# Altium footprint library CM5_Projeto_R6.PcbLib: 38 footprints (part 2 of 3)
Each footprint in its own frame and in the unit in brackets; x right, y up, seen from the top. Pads: shape width x height; smd on the part's side, far side on the other; paste and mask are expansions set on the pad; w line width, h text height; cw(c..) or ccw(c..) is an arc to the next point about the centre after c.
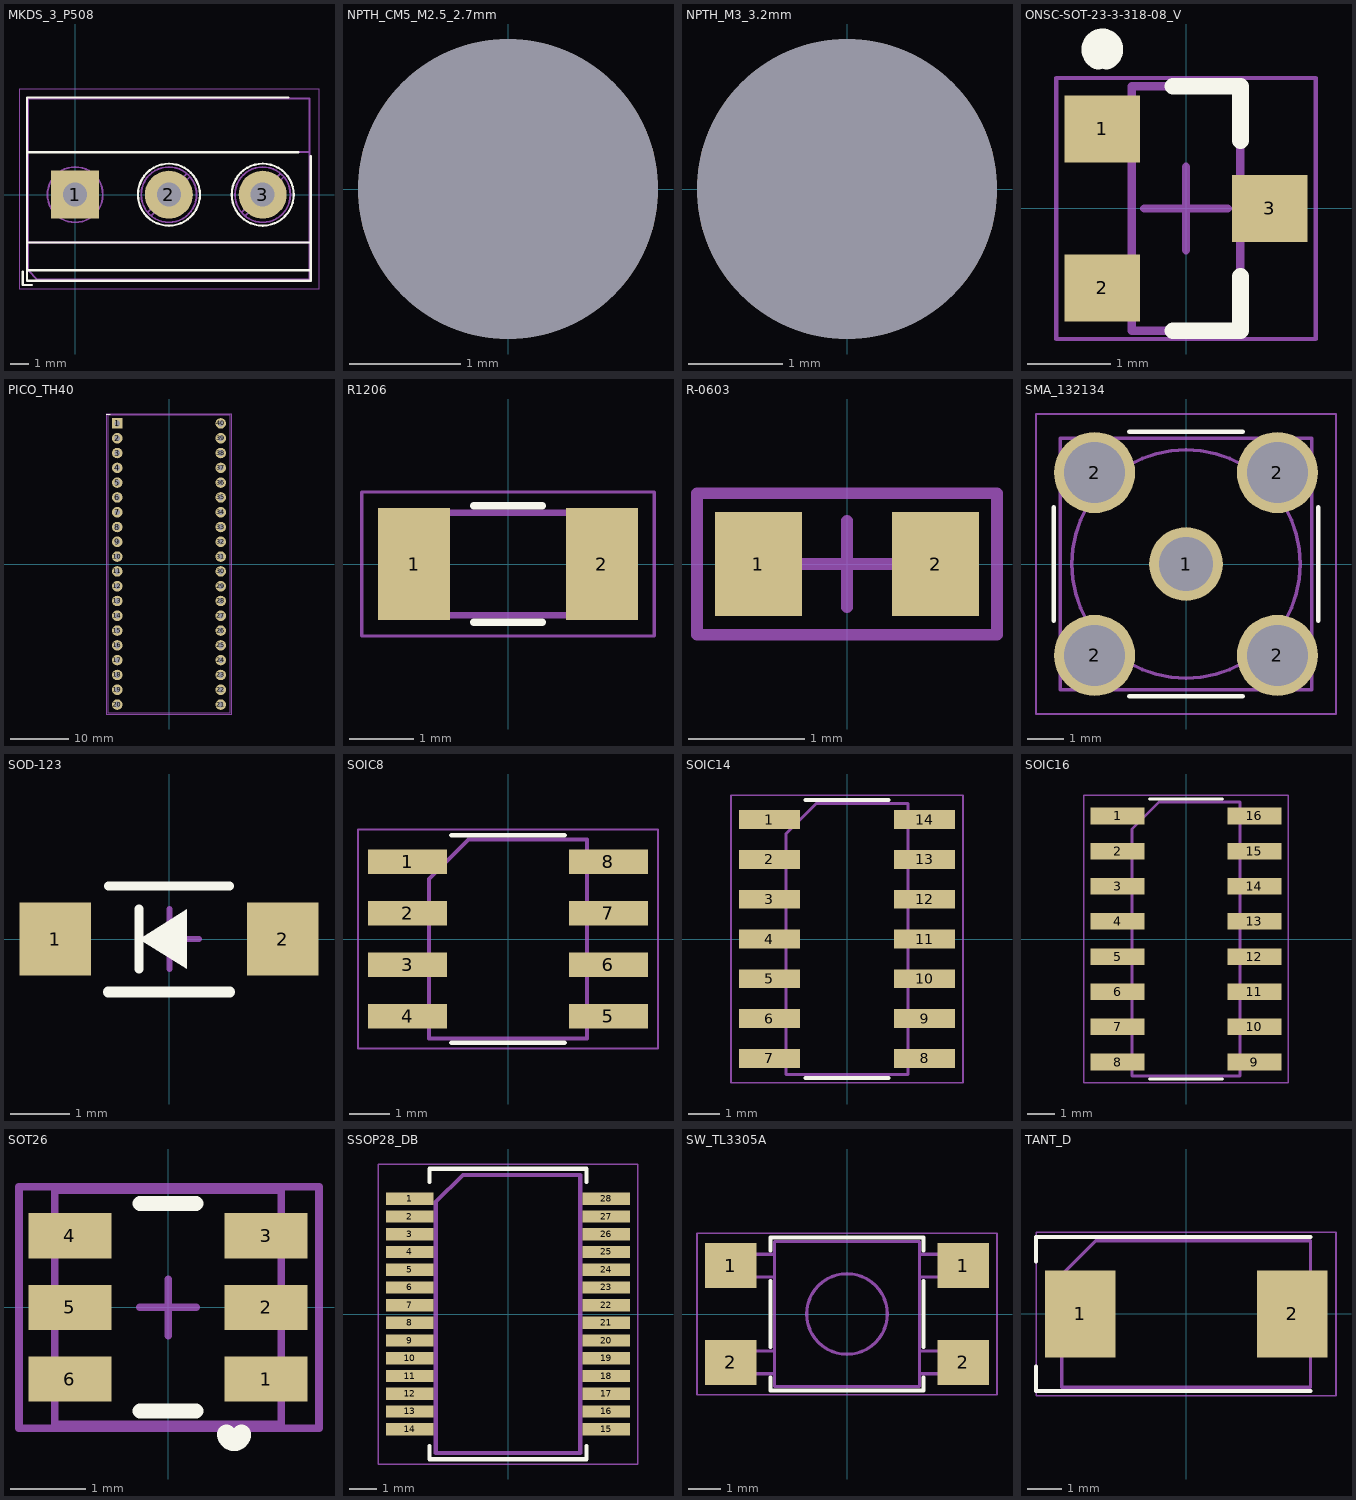
[diagram p1: the footprints below, top view; thin cyan lines are the x and y axes]

## MKDS_3_P508 [mm] "CM5 R3; fonte: CM5_Photonic.PcbLib; serigrafia revisada a 10 mil"
pads (3):
  rect 2.6x2.6 hole 1.3 paste-2.6 mask+0.05: 1(0,0)
  round 2.6 hole 1.3 paste-2.6 mask+0.05: 2(5.08,0) 3(10.16,0)
Top Overlay:
  lines w0.12: -2.84,-4.16 -2.84,-4.9 -2.34,-4.9 ; -2.6,-4.1 12.76,-4.1 ; -2.6,-2.6 12.76,-2.6 ; -2.6,2.301 12.106,2.301 ; 11.553,5.261 -2.6,5.261 -2.6,-4.66 12.76,-4.66 12.76,2.096 ; 3.4,0 3.414,-0.219 3.457,-0.435 3.528,-0.643 3.625,-0.84 3.747,-1.023 3.892,-1.188 4.057,-1.333 4.24,-1.455 4.437,-1.552 4.645,-1.623 4.861,-1.666 5.08,-1.68 5.299,-1.666 5.515,-1.623 5.723,-1.552 5.92,-1.455 6.103,-1.333 6.268,-1.188 6.413,-1.023 6.535,-0.84 6.632,-0.643 6.703,-0.435 6.746,-0.219 6.76,0 6.746,0.219 6.703,0.435 6.632,0.643 6.535,0.84 6.413,1.023 6.268,1.188 6.103,1.333 5.92,1.455 5.723,1.552 5.515,1.623 5.299,1.666 5.08,1.68 4.861,1.666 4.645,1.623 4.437,1.552 4.24,1.455 4.057,1.333 3.892,1.188 3.747,1.023 3.625,0.84 3.528,0.643 3.457,0.435 3.414,0.219 3.4,0 ; 8.48,0 8.494,-0.219 8.537,-0.435 8.608,-0.643 8.705,-0.84 8.827,-1.023 8.972,-1.188 9.137,-1.333 9.32,-1.455 9.517,-1.552 9.725,-1.623 9.941,-1.666 10.16,-1.68 10.379,-1.666 10.595,-1.623 10.803,-1.552 11,-1.455 11.183,-1.333 11.348,-1.188 11.493,-1.023 11.615,-0.84 11.712,-0.643 11.783,-0.435 11.826,-0.219 11.84,0 11.826,0.219 11.783,0.435 11.712,0.643 11.615,0.84 11.493,1.023 11.348,1.188 11.183,1.333 11,1.455 10.803,1.552 10.595,1.623 10.379,1.666 10.16,1.68 9.941,1.666 9.725,1.623 9.517,1.552 9.32,1.455 9.137,1.333 8.972,1.188 8.827,1.023 8.705,0.84 8.608,0.643 8.537,0.435 8.494,0.219 8.48,0
Bottom Assembly:
  drawing of 158 lines, arcs and shapes, not listed
Bottom Component Center:
  lines w0.05: -3.04,-5.1 -3.04,5.71 13.21,5.71 13.21,-5.1 -3.04,-5.1
3D body "MKDS_3_P508.step": height 13.8, standoff 0, extent -3.28,-4.6 12.7,5.2

## NPTH_CM5_M2.5_2.7mm [mm] "CM5 R3; fonte: CM5_Photonic.PcbLib; serigrafia revisada a 10 mil"
pads (1):
  round 2.7 hole 2.7 unplated paste-2.7 mask+0: ""(0,0)

## NPTH_M3_3.2mm [mm] "CM5 R3; fonte: CM5_Photonic.PcbLib; serigrafia revisada a 10 mil"
pads (1):
  round 3.2 hole 3.2 unplated paste-3.2 mask+0: ""(0,0)

## ONSC-SOT-23-3-318-08_V [mm] "CM5 R3; fonte: PCB-PCEIOT.PcbLib; serigrafia revisada a 10 mil"
pads (3):
  rect 0.9x0.8 smd paste+0 mask+0.05: 1(-1,0.95) 2(-1,-0.95) 3(1,0)
Top Overlay:
  lines w0.2: -0.155,-1.46 0.65,-1.46 0.65,-0.81 ; -0.155,1.46 0.65,1.46 0.65,0.81
  lines w0.25: -1.048,1.785 -1.054,1.787 -1.067,1.794 -1.079,1.803 -1.09,1.813 -1.099,1.824 -1.108,1.836 -1.114,1.85 -1.12,1.863 -1.123,1.878 -1.125,1.893 -1.125,1.907 -1.123,1.922 -1.12,1.937 -1.114,1.95 -1.108,1.964 -1.099,1.976 -1.09,1.987 -1.079,1.997 -1.067,2.006 -1.054,2.013 -1.04,2.018 -1.026,2.022 -1.011,2.025 -0.996,2.025 -0.982,2.024 -0.967,2.021 -0.953,2.016 -0.94,2.009 -0.927,2.002 -0.916,1.992 -0.905,1.982 -0.896,1.97 -0.889,1.957 -0.883,1.944 -0.878,1.929 -0.876,1.915 -0.875,1.9 -0.876,1.885 -0.878,1.871 -0.883,1.856 -0.889,1.843 -0.896,1.83 -0.905,1.818 -0.916,1.808 -0.927,1.798 -0.94,1.791 -0.951,1.785
Bottom Assembly:
  lines w0.05: -1.55,-1.56 -1.55,1.56 1.55,1.56 1.55,-1.56 -1.55,-1.56
  lines w0.1: -0.5,0 0.5,0 ; 0,-0.5 0,0.5
Mechanical 13:
  lines w0.1: -0.65,-1.46 -0.65,1.46 0.65,1.46 0.65,-1.46 -0.65,-1.46
3D body "SOT95P240X115-3M.step": height 1.15, standoff 0, extent -1.275,-1.5 1.275,1.5

## PICO_TH40 [mm] "CM5 R3; fonte: CM5_Photonic.PcbLib; serigrafia revisada a 10 mil"
pads (40):
  rect 1.8x1.8 hole 1 paste-1.8 mask+0.05: 1(-8.89,24.13)
  round 1.8 hole 1 paste-1.8 mask+0.05: 2(-8.89,21.59) 3(-8.89,19.05) 4(-8.89,16.51) 5(-8.89,13.97) 6(-8.89,11.43) 7(-8.89,8.89) 8(-8.89,6.35) 9(-8.89,3.81) 10(-8.89,1.27) 11(-8.89,-1.27) 12(-8.89,-3.81) 13(-8.89,-6.35) 14(-8.89,-8.89) 15(-8.89,-11.43) 16(-8.89,-13.97) 17(-8.89,-16.51) 18(-8.89,-19.05) 19(-8.89,-21.59) 20(-8.89,-24.13) 21(8.89,-24.13) 22(8.89,-21.59) 23(8.89,-19.05) 24(8.89,-16.51) 25(8.89,-13.97) 26(8.89,-11.43) 27(8.89,-8.89) 28(8.89,-6.35) 29(8.89,-3.81) 30(8.89,-1.27) 31(8.89,1.27) 32(8.89,3.81) 33(8.89,6.35) 34(8.89,8.89) 35(8.89,11.43) 36(8.89,13.97) 37(8.89,16.51) 38(8.89,19.05) 39(8.89,21.59) 40(8.89,24.13)
Top Overlay:
  lines w0.12: -10.75,25.7 -10.05,25.7
Bottom Assembly:
  lines w0.1: -10.5,-25.5 -10.5,25.5 10.5,25.5 10.5,-25.5 -10.5,-25.5
Bottom Component Center:
  lines w0.05: -10.75,-25.75 -10.75,25.75 10.75,25.75 10.75,-25.75 -10.75,-25.75
3D body "Pico_W_SC0918_usuario.step": height 10.1, standoff 6.5, extent -10.497,-25.502 10.503,26.798
3D body "Pico_TH40_headers_R4.step": height 7.7, standoff 0, extent -10.09,-25.4 10.09,25.4

## R1206 [mm] "CM5 R3; fonte: CM5_Photonic.PcbLib; serigrafia revisada a 10 mil"
pads (2):
  rect 1.125x1.75 smd paste+0 mask+0.05: 1(-1.463,0) 2(1.462,0)
Top Overlay:
  lines w0.12: -0.532,-0.91 0.532,-0.91 ; -0.532,0.91 0.532,0.91
Bottom Assembly:
  lines w0.1: -1.6,-0.8 -1.6,0.8 1.6,0.8 1.6,-0.8 -1.6,-0.8
Bottom Component Center:
  lines w0.05: -2.28,-1.12 -2.28,1.12 2.28,1.12 2.28,-1.12 -2.28,-1.12
3D body "R1206.step": height 0.55, standoff 0, extent -1.6,-0.8 1.6,0.8

## R-0603 [mm] "CM5 R3; fonte: PcbLib_Source_IoT.PcbLib; serigrafia revisada a 10 mil"
pads (2):
  rect 0.75x0.9 smd paste+0 mask+0.05: 1(-0.765,0) 2(0.765,0)
Bottom Assembly:
  lines w0.1: -0.375,0 0.375,0 ; 0,-0.375 0,0.375 ; -1.295,-0.61 -1.295,0.61 1.295,0.61 1.295,-0.61 -1.295,-0.61
Bottom Component Center:
  lines w0.1: -1.295,-0.61 -1.295,0.61 1.295,0.61 1.295,-0.61 -1.295,-0.61
3D body "User Library-Chip Resistor_0603 (1608).step": height 0.47, standoff 0, extent -0.8,-0.401 0.8,0.401

## SMA_132134 [mm] "CM5 R3; fonte: CM5_Photonic.PcbLib; serigrafia revisada a 10 mil"
pads (5):
  round 2.05 hole 1.5 paste-2.05 mask+0.05: 1(0,0)
  round 2.25 hole 1.7 paste-2.25 mask+0.05: 2(-2.54,-2.54) 2(-2.54,2.54) 2(2.54,-2.54) 2(2.54,2.54)
Top Overlay:
  lines w0.12: -3.68,-1.573 -3.68,1.573 ; -1.573,-3.68 1.573,-3.68 ; -1.573,3.68 1.573,3.68 ; 3.68,-1.573 3.68,1.573
Bottom Assembly:
  lines w0.1: -3.5,-3.5 -3.5,3.5 3.5,3.5 3.5,-3.5 -3.5,-3.5 ; -3.175,0 -3.148,-0.414 -3.067,-0.822 -2.933,-1.215 -2.75,-1.587 -2.519,-1.933 -2.245,-2.245 -1.933,-2.519 -1.587,-2.75 -1.215,-2.933 -0.822,-3.067 -0.414,-3.148 0,-3.175 0.414,-3.148 0.822,-3.067 1.215,-2.933 1.587,-2.75 1.933,-2.519 2.245,-2.245 2.519,-1.933 2.75,-1.587 2.933,-1.215 3.067,-0.822 3.148,-0.414 3.175,0 3.148,0.414 3.067,0.822 2.933,1.215 2.75,1.587 2.519,1.933 2.245,2.245 1.933,2.519 1.587,2.75 1.215,2.933 0.822,3.067 0.414,3.148 0,3.175 -0.414,3.148 -0.822,3.067 -1.215,2.933 -1.587,2.75 -1.933,2.519 -2.245,2.245 -2.519,1.933 -2.75,1.587 -2.933,1.215 -3.067,0.822 -3.148,0.414 -3.175,0
Bottom Component Center:
  lines w0.05: -4.17,-4.17 -4.17,4.17 4.17,4.17 4.17,-4.17 -4.17,-4.17
3D body "SMA_132134.step": height 8.1, standoff 0, extent -3.5,-3.5 3.5,3.5

## SOD-123 [mm] "CM5 R3; fonte: PcbLib_Source_IoT.PcbLib; serigrafia revisada a 10 mil"
pads (2):
  rect 1.2x1.22 smd paste+0 mask+0.05: 1(-1.905,0) 2(1.905,0)
Top Overlay:
  region: 0.3,-0.5 0.3,0.5 -0.5,0
  lines w0.152: -1.016,0.889 1.016,0.889 ; -0.5,-0.5 -0.5,0.5
  lines w0.178: -1.016,-0.889 1.016,-0.889
Bottom Assembly:
  lines w0.1: -0.495,0 0.505,0 ; 0.005,-0.5 0.005,0.5
3D body "SOD-123.stp": height 1.35, standoff 0, extent -1.932,-0.9 1.932,0.9

## SOIC8 [mm] "CM5 R3; fonte: CM5_Photonic.PcbLib; serigrafia revisada a 10 mil"
pads (8):
  rect 1.95x0.6 smd paste+0 mask+0.05: 1(-2.475,1.905) 2(-2.475,0.635) 3(-2.475,-0.635) 4(-2.475,-1.905) 5(2.475,-1.905) 6(2.475,-0.635) 7(2.475,0.635) 8(2.475,1.905)
Top Overlay:
  lines w0.12: -1.396,-2.56 0,-2.56 1.396,-2.56 ; -1.396,2.56 0,2.56 1.396,2.56
Bottom Assembly:
  lines w0.1: -1.95,-2.45 -1.95,1.475 -0.975,2.45 1.95,2.45 1.95,-2.45 -1.95,-2.45
Bottom Component Center:
  lines w0.05: -3.7,-2.7 -3.7,2.7 3.7,2.7 3.7,-2.7 -3.7,-2.7
3D body "SOIC8.step": height 1.75, standoff 0, extent -3,-2.45 3,2.45

## SOIC14 [mm] "CM5 R3; fonte: CM5_Photonic.PcbLib; serigrafia revisada a 10 mil"
pads (14):
  rect 1.95x0.6 smd paste+0 mask+0.05: 1(-2.475,3.81) 2(-2.475,2.54) 3(-2.475,1.27) 4(-2.475,0) 5(-2.475,-1.27) 6(-2.475,-2.54) 7(-2.475,-3.81) 8(2.475,-3.81) 9(2.475,-2.54) 10(2.475,-1.27) 11(2.475,0) 12(2.475,1.27) 13(2.475,2.54) 14(2.475,3.81)
Top Overlay:
  lines w0.12: -1.323,-4.435 0,-4.435 1.323,-4.435 ; -1.323,4.435 0,4.435 1.323,4.435
Bottom Assembly:
  lines w0.1: -1.95,-4.325 -1.95,3.35 -0.975,4.325 1.95,4.325 1.95,-4.325 -1.95,-4.325
Bottom Component Center:
  lines w0.05: -3.7,-4.58 -3.7,4.58 3.7,4.58 3.7,-4.58 -3.7,-4.58
3D body "SOIC14.step": height 1.75, standoff 0, extent -3,-4.35 3,4.35

## SOIC16 [mm] "CM5 R3; fonte: CM5_Photonic.PcbLib; serigrafia revisada a 10 mil"
pads (16):
  rect 1.95x0.6 smd paste+0 mask+0.05: 1(-2.475,4.445) 2(-2.475,3.175) 3(-2.475,1.905) 4(-2.475,0.635) 5(-2.475,-0.635) 6(-2.475,-1.905) 7(-2.475,-3.175) 8(-2.475,-4.445) 9(2.475,-4.445) 10(2.475,-3.175) 11(2.475,-1.905) 12(2.475,-0.635) 13(2.475,0.635) 14(2.475,1.905) 15(2.475,3.175) 16(2.475,4.445)
Top Overlay:
  lines w0.12: -1.306,-5.06 0,-5.06 1.306,-5.06 ; -1.306,5.06 0,5.06 1.306,5.06
Bottom Assembly:
  lines w0.1: -1.95,-4.95 -1.95,3.975 -0.975,4.95 1.95,4.95 1.95,-4.95 -1.95,-4.95
Bottom Component Center:
  lines w0.05: -3.7,-5.2 -3.7,5.2 3.7,5.2 3.7,-5.2 -3.7,-5.2
3D body "SOIC16.step": height 1.75, standoff 0, extent -3,-4.95 3,4.95

## SOT26 [mm] "CM5 R3; fonte: PcbLib_Source_IoT.PcbLib; serigrafia revisada a 10 mil"
pads (6):
  rect 1.1x0.6 smd paste+0 mask+0.04: 1(1.3,-0.95) 2(1.3,0) 3(1.3,0.95) 4(-1.3,0.95) 5(-1.3,0) 6(-1.3,-0.95)
Top Overlay:
  lines w0.2: -0.37,-1.375 0.37,-1.375 ; -0.37,1.375 0.37,1.375
  lines w0.254: 0.775,-1.677 0.776,-1.69 0.779,-1.704 0.785,-1.718 0.792,-1.731 0.802,-1.743 0.813,-1.753 0.825,-1.762 0.838,-1.768 0.853,-1.772 0.868,-1.775 0.882,-1.775 0.897,-1.772 0.912,-1.768 0.925,-1.762 0.937,-1.753 0.948,-1.743 0.958,-1.731 0.965,-1.718 0.971,-1.704 0.974,-1.69 0.975,-1.677
Bottom Assembly:
  lines w0.1: -0.375,0 0.375,0 ; 0,-0.375 0,0.375 ; -1.975,-1.6 2,-1.6 2,1.6 -1.975,1.6 -1.975,-1.6
Bottom Component Center:
  lines w0.1: -1.5,-1.55 -1.5,1.55 1.5,1.55 1.5,-1.55 -1.5,-1.55
3D body "SOT26_DIO.step": height 1.4, standoff 0, extent -1.499,-1.549 1.499,1.549

## SSOP28_DB [mm] "CM5 R3; fonte: CM5_Photonic.PcbLib; serigrafia revisada a 10 mil"
pads (28):
  rect 1.75x0.45 smd paste+0 mask+0.045: 1(-3.6,4.225) 2(-3.6,3.575) 3(-3.6,2.925) 4(-3.6,2.275) 5(-3.6,1.625) 6(-3.6,0.975) 7(-3.6,0.325) 8(-3.6,-0.325) 9(-3.6,-0.975) 10(-3.6,-1.625) 11(-3.6,-2.275) 12(-3.6,-2.925) 13(-3.6,-3.575) 14(-3.6,-4.225) 15(3.6,-4.225) 16(3.6,-3.575) 17(3.6,-2.925) 18(3.6,-2.275) 19(3.6,-1.625) 20(3.6,-0.975) 21(3.6,-0.325) 22(3.6,0.325) 23(3.6,0.975) 24(3.6,1.625) 25(3.6,2.275) 26(3.6,2.925) 27(3.6,3.575) 28(3.6,4.225)
Top Overlay:
  lines w0.15: -2.875,-4.835 -2.875,-5.325 2.875,-5.325 2.875,-4.835 ; -2.875,4.835 -2.875,5.325 2.875,5.325 2.875,4.835
Bottom Assembly:
  lines w0.15: -2.65,-5.1 -2.65,4.1 -1.65,5.1 2.65,5.1 2.65,-5.1 -2.65,-5.1
Bottom Component Center:
  lines w0.05: -4.75,-5.5 -4.75,5.5 4.75,5.5 4.75,-5.5 -4.75,-5.5
3D body "SSOP28_DB.step": height 2.1, standoff 0, extent -3.9,-5.1 3.9,5.1

## SW_TL3305A [mm] "CM5 R3; fonte: CM5_Photonic.PcbLib; serigrafia revisada a 10 mil"
pads (4):
  rect 1.6x1.4 smd paste+0 mask+0.05: 1(-3.6,1.5) 1(3.6,1.5) 2(-3.6,-1.5) 2(3.6,-1.5)
Top Overlay:
  lines w0.12: -2.37,-1.97 -2.37,-2.37 2.37,-2.37 2.37,-1.97 ; -2.37,-1.03 -2.37,1.03 ; -2.37,1.97 -2.37,2.37 2.37,2.37 2.37,1.97 ; 2.37,-1.03 2.37,1.03
Bottom Assembly:
  lines w0.1: -3,-1.85 -3,-1.15 ; -3,1.15 -3,1.85 ; -2.25,-1.85 -3.75,-1.85 -3.75,-1.15 -2.25,-1.15 ; -2.25,1.15 -3.75,1.15 -3.75,1.85 -2.25,1.85 ; 2.25,-1.85 3.75,-1.85 3.75,-1.15 2.25,-1.15 ; 2.25,1.15 3.75,1.15 3.75,1.85 2.25,1.85 ; 3,-1.85 3,-1.15 ; 3,1.15 3,1.85 ; -2.25,-2.25 -2.25,2.25 2.25,2.25 2.25,-2.25 -2.25,-2.25 ; -1.25,0 -1.239,-0.163 -1.207,-0.324 -1.155,-0.478 -1.083,-0.625 -0.992,-0.761 -0.884,-0.884 -0.761,-0.992 -0.625,-1.083 -0.478,-1.155 -0.324,-1.207 -0.163,-1.239 0,-1.25 0.163,-1.239 0.324,-1.207 0.478,-1.155 0.625,-1.083 0.761,-0.992 0.884,-0.884 0.992,-0.761 1.083,-0.625 1.155,-0.478 1.207,-0.324 1.239,-0.163 1.25,0 1.239,0.163 1.207,0.324 1.155,0.478 1.083,0.625 0.992,0.761 0.884,0.884 0.761,0.992 0.625,1.083 0.478,1.155 0.324,1.207 0.163,1.239 0,1.25 -0.163,1.239 -0.324,1.207 -0.478,1.155 -0.625,1.083 -0.761,0.992 -0.884,0.884 -0.992,0.761 -1.083,0.625 -1.155,0.478 -1.207,0.324 -1.239,0.163 -1.25,0
Bottom Component Center:
  lines w0.05: -4.65,-2.5 -4.65,2.5 4.65,2.5 4.65,-2.5 -4.65,-2.5
3D body "SW_TL3305A.step": height 2.4, standoff 0, extent -4.05,-2.15 4.05,2.15

## TANT_D [mm] "CM5 R3; fonte: CM5_Photonic.PcbLib; serigrafia revisada a 10 mil"
pads (2):
  rect 2.075x2.55 smd paste+0 mask+0.05: 1(-3.113,0) 2(3.113,0)
Top Overlay:
  lines w0.12: -4.41,-1.538 -4.41,-2.26 3.65,-2.26 ; -4.41,1.538 -4.41,2.26 3.65,2.26
Bottom Assembly:
  lines w0.1: -3.65,-2.15 -3.65,1.15 -2.65,2.15 3.65,2.15 3.65,-2.15 -3.65,-2.15
Bottom Component Center:
  lines w0.05: -4.4,-2.4 -4.4,2.4 4.4,2.4 4.4,-2.4 -4.4,-2.4
3D body "TANT_D.step": height 3.1, standoff 0, extent -3.65,-2.15 3.65,2.15